# Altium integrated library 670688000.IntLib: 1 symbol
Pins are listed as number, name and electrical type; pins without a type are passive.

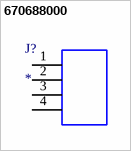
[diagram p0: symbol 670688000]

## 670688000
designator J?
MF: {'manufacturer': u'Molex'}; MP: 670688000; Package: None; Price: None; Value: *; Availability: Unavailable
footprint CONN_67068-8000_MOL
pins: 1, 2, 3, 4